# EAGLE library part CON-GARRY_332-06 (library HA_FONA_LARA_20)
6 Pin - 2mm Dual Row Source: www.mpe-connector.de / garry_shortform_2012.pdf
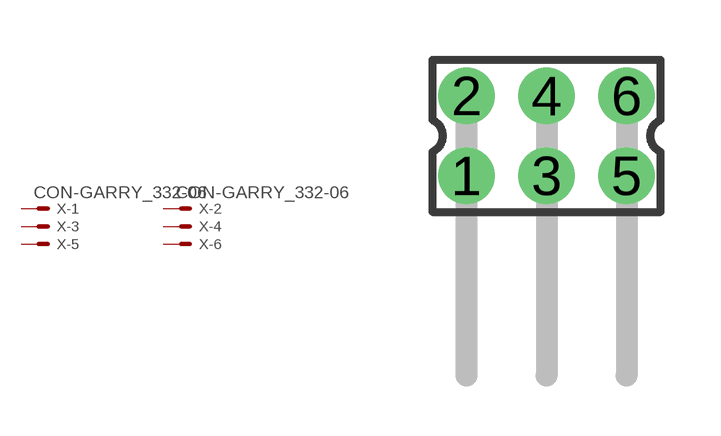
[diagram p8: symbol with the pads of CON-GARRY_332-06; footprint CON-GARRY_332-06]

Designator prefix X; gates -1=CON-GARRY_MV -2=CON-GARRY_MV -3=CON-GARRY_M -4=CON-GARRY_M -5=CON-GARRY_M -6=CON-GARRY_M

## CON-GARRY_332-06  [CON-GARRY_332-06]
1  -1:S  pas
2  -2:S  pas
3  -3:S  pas
4  -4:S  pas
5  -5:S  pas
6  -6:S  pas

## Footprint CON-GARRY_332-06 (pad centres in mm)
6 Pin - 2mm Dual Row Source: www.mpe-connector.de / garry_shortform_2012.pdf
drill 0.9 pad 1.27: 1 -2,-1; 2 -2,1; 3 0,-1; 4 0,1; 5 2,-1; 6 2,1